# Altium footprint library resistive.PcbLib: 13 footprints
Each footprint in its own frame and in the unit in brackets; x right, y up, seen from the top. Pads: shape width x height; smd on the part's side, far side on the other; paste and mask are expansions set on the pad; w line width, h text height; cw(c..) or ccw(c..) is an arc to the next point about the centre after c.
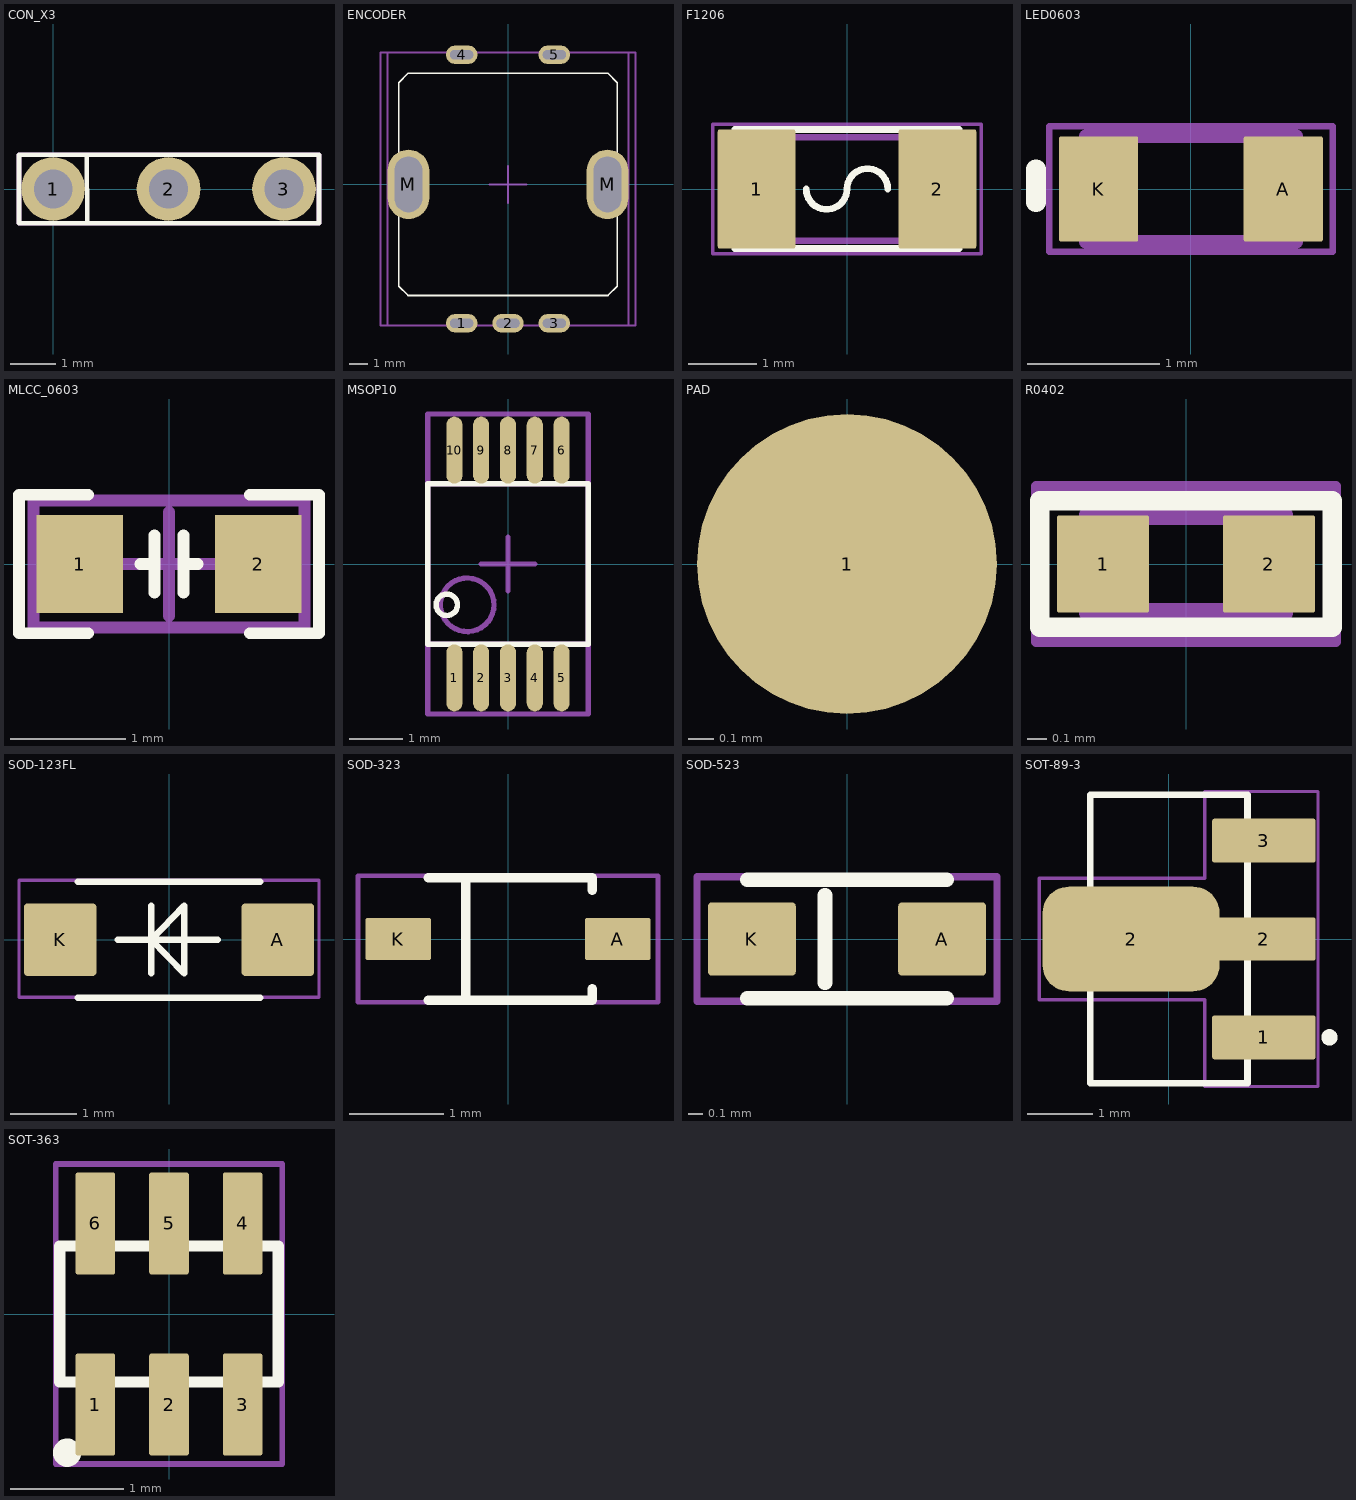
[diagram p0: the footprints below, top view; thin cyan lines are the x and y axes]

## CON_X3 [mm]
pads (3):
  round 1.4 hole 0.85: 1(0,0) 2(2.54,0) 3(5.08,0)
Top Overlay:
  lines w0.1: 0.741,0.75 0.75,-0.725 ; -0.75,-0.75 5.85,-0.75 5.85,0.75 -0.75,0.75 -0.75,-0.75
Top Courtyard:
  lines w0.1: -0.75,-0.75 5.85,-0.75 5.85,0.75 -0.75,0.75 -0.75,-0.75

## ENCODER [mm] "Rotary encoder"
pads (7):
  oval 1.7x1 hole 0.5 slot 1.25 at 0 deg: 1(-2.5,-7.5) 2(0,-7.5) 3(2.5,-7.5) 4(-2.5,7) 5(2.5,7)
  rrect100% 2.25x3.75 hole 1.5 slot 3 at 90 deg: M(-5.375,0)
  oval 2.25x3.75 hole 1.5 slot 3 at 90 deg: M(5.375,0)
Top Overlay:
  lines w0.102: -5.9,-5.5 -5.4,-6 5.4,-6 5.9,-5.5 5.9,5.5 5.4,6 -5.4,6 -5.9,5.5 -5.9,-5.5
Top Assembly:
  lines w0.102: -1,0 1,0 ; 0,-1 0,1 ; -6.875,-7.625 -6.875,7.125 6.875,7.125 6.875,-7.625 -6.875,-7.625
Top Courtyard:
  lines w0.102: -6.5,-7.625 6.5,-7.625 6.5,7.125 -6.5,7.125 -6.5,-7.625
3D body "EC11_Rotary_Encoder_Switched.STEP": height 21.18, standoff -3.4, extent -6.55,-7.68 6.55,7.08

## F1206 [mm] "Littelfuse 468 series 1206 fuse"
height 0.7
pads (2):
  rrect5% 1.14x1.75 smd: 1(-1.33,0) 2(1.33,0)
Top Overlay:
  lines w0.1: -1.65,-0.875 1.65,-0.875 ; -1.65,0.875 1.65,0.875 ; -0.6,0 ccw(c-0.3,0) 0,0 cw(c0.3,0) 0.6,0
Top Assembly:
  lines w0.1: -1.59,-0.76 -1.59,0.76 1.59,0.76 1.59,-0.76 -1.59,-0.76
Top Courtyard:
  lines w0.05: -1.975,-0.95 -1.975,0.95 1.975,0.95 1.975,-0.95 -1.975,-0.95
3D body "F1206.step": height 0.6, standoff 0, extent -1.6,-0.854 1.6,0.846

## LED0603 [mm] "Chip LED 0603 (1608 metric), pad 1 cathode (left)"
height 0.8
pads (2):
  rrect5% 0.6x0.8 smd: A(0.7,0) K(-0.7,0)
Top Overlay:
  lines w0.15: -1.175,-0.1 -1.175,0.15
Top Assembly:
  lines w0.1: -0.8,-0.4 -0.8,0.4 0.8,0.4 0.8,-0.4 -0.8,-0.4
Top Courtyard:
  lines w0.05: -1.075,-0.475 -1.075,0.475 1.075,0.475 1.075,-0.475 -1.075,-0.475
3D body "LED0603_body.step": height 0.28, standoff 0, extent -0.8,-0.4 0.8,0.4

## MLCC_0603 [mm] "MLCC 0603"
height 0.7
pads (2):
  rrect1% 0.75x0.85 smd: 1(-0.775,0) 2(0.775,0)
Top Overlay:
  lines w0.102: -0.7,-0.6 -1.3,-0.6 -1.3,0.6 -0.7,0.6 ; -0.25,0 -0.125,0 ; -0.125,-0.25 -0.125,0.25 ; 0.125,-0.25 0.125,0.25 ; 0.125,0 0.25,0 ; 0.7,-0.6 1.3,-0.6 1.3,0.6 0.7,0.6
Top Assembly:
  lines w0.102: -1.175,-0.55 -1.175,0.55 1.175,0.55 1.175,-0.55 -1.175,-0.55
Top Courtyard:
  lines w0.102: -0.45,0 0.45,0 ; 0,-0.45 0,0.45 ; -1.175,-0.55 -1.175,0.55 1.175,0.55 1.175,-0.55 -1.175,-0.55
3D body "CAPC1608X07L.step": height 0.7, standoff 0, extent -0.85,-0.45 0.85,0.45

## MSOP10 [mm] "MSOP10 3x3 x 0.5"
height 1
pads (10):
  oval 0.3x1.25 smd: 1(-1,-2.125) 2(-0.5,-2.125) 3(0,-2.125) 4(0.5,-2.125) 5(1,-2.125) 6(1,2.125) 7(0.5,2.125) 8(0,2.125) 9(-0.5,2.125) 10(-1,2.125)
Top Overlay:
  circle w0.102: c-1.143,-0.762 r0.2
  lines w0.102: -1.5,-1.5 -1.5,1.5 1.5,1.5 1.5,-1.5 -1.5,-1.5
Top Assembly:
  circle w0.1: c-0.762,-0.762 r0.5
  lines w0.102: -1.5,-1.5 -1.5,1.5 1.5,1.5 1.5,-1.5 -1.5,-1.5
Top Courtyard:
  lines w0.1: -0.5,0 0.5,0 ; 0,-0.5 0,0.5
  lines w0.102: -1.5,-2.8 -1.5,2.8 1.5,2.8 1.5,-2.8 -1.5,-2.8
3D body "MSOP10.step": height 1, standoff 0, extent -1.5,-2.3 1.5,2.3

## PAD [mm]
pads (1):
  round 1.2 smd paste-2539.97 mask+0: 1(0,0)

## R0402 [mm] "Chip resistor 0402 (1005 metric)"
height 0.35
pads (2):
  rrect5% 0.473x0.5 smd: 1(-0.426,0) 2(0.426,0)
Top Overlay:
  lines w0.1: -0.75,-0.325 0.75,-0.325 0.75,0.325 -0.75,0.325 -0.75,-0.325
Top Assembly:
  lines w0.1: -0.5,-0.25 0.5,-0.25 0.5,0.25 -0.5,0.25 -0.5,-0.25
Top Courtyard:
  lines w0.05: -0.77,-0.4 0.77,-0.4 0.77,0.4 -0.77,0.4 -0.77,-0.4
3D body "R0402.step": height 0.35, standoff 0, extent -0.5,-0.25 0.5,0.25

## SOD-123FL [mm] "SOD-123FL diode/TVS, pad 1 = cathode (left), pad 2 = anode"
height 1
pads (2):
  rrect10% 1.1x1.1 smd: A(1.65,0) K(-1.65,0)
Top Overlay:
  lines w0.1: -1.38,-0.88 1.38,-0.88 ; -1.38,0.88 1.38,0.88 ; -0.78,0 0.74,0 ; -0.27,-0.51 -0.27,0.51 ; -0.27,0 0.23,-0.51 0.23,0.51 -0.27,0
Top Courtyard:
  lines w0.05: -2.275,-0.875 2.275,-0.875 2.275,0.9 -2.275,0.9 -2.275,-0.875
3D body "SOD-123FL.step": height 0.9, standoff -0.11, extent -1.8,-0.9 1.8,0.9

## SOD-323 [mm] "SOD-323 diode, pads K (cathode, left) / A"
height 1.05
pads (2):
  rrect10% 0.7x0.45 smd: A(1.17,0) K(-1.17,0)
Top Overlay:
  lines w0.1: -0.85,-0.655 0.9,-0.655 ; -0.85,0.655 0.9,0.655 ; -0.45,-0.65 -0.45,0.65 ; 0.9,-0.65 0.9,-0.53 ; 0.9,0.52 0.9,0.65
Top Courtyard:
  lines w0.05: -1.6,-0.675 -1.6,0.675 1.6,0.675 1.6,-0.675 -1.6,-0.675
3D body "SOD-323.step": height 0.95, standoff 0, extent -1.325,-0.65 1.325,0.65

## SOD-523 [mm] "SOD-523 (SC-79) diode, pads K (cathode, left) / A"
height 0.7
pads (2):
  rrect10% 0.6x0.5 smd: A(0.65,0) K(-0.65,0)
Top Overlay:
  lines w0.1: -0.68,-0.405 0.68,-0.405 ; -0.68,0.405 0.68,0.405 ; -0.15,-0.3 -0.15,0.3
Top Courtyard:
  lines w0.05: -1.025,-0.425 -1.025,0.425 1.025,0.425 1.025,-0.425 -1.025,-0.425
3D body "SOD-523.step": height 0.7, standoff -0.01, extent -0.787,-0.399 0.813,0.401

## SOT-89-3 [mm] "SOT-89-3, 1=OUT 2=GND(tab) 3=IN for 78L05 C20628877"
height 1.6
pads (4):
  rrect10% 1.575x0.672 smd: 1(1.45,-1.5) 3(1.45,1.5)
  rrect50% 2.7x1.6 smd: 2(-0.575,0)
  rrect10% 1.575x0.66 smd: 2(1.45,0)
Top Overlay:
  circle w0.15: c2.45,-1.5 r0.05
  lines w0.1: -1.2,-2.2 1.2,-2.2 1.2,2.2 -1.2,2.2 -1.2,-2.2
Top Courtyard:
  lines w0.05: -1.975,-0.925 -1.975,0.925 0.55,0.925 0.55,2.25 2.275,2.25 2.275,-2.25 0.55,-2.25 0.55,-0.925 -1.975,-0.925
3D body "SOT-89-3.step": height 1.5, standoff -0.03, extent -1.875,-2.24 2.225,2.24

## SOT-363 [mm] "SOT-363 (SC-70-6), pin 1 bottom-left, 0.65mm pitch"
height 1
pads (6):
  rrect10% 0.35x0.9 smd: 1(-0.65,-0.8) 2(0,-0.8) 3(0.65,-0.8) 4(0.65,0.8) 5(0,0.8) 6(-0.65,0.8)
Top Overlay:
  circle w0.15: c-0.9,-1.225 r0.05
  lines w0.1: -0.965,-0.6 0.965,-0.6 0.965,0.6 -0.965,0.6 -0.965,-0.6
Top Courtyard:
  lines w0.05: -1,-1.325 -1,1.325 1,1.325 1,-1.325 -1,-1.325
3D body "SOT-363.step": height 0.95, standoff 0, extent -1,-1.05 1,1.05